# Altium footprint library Propia.PcbLib: 378 footprints (part 6 of 24)
Each footprint in its own frame and in the unit in brackets; x right, y up, seen from the top. Pads: shape width x height; smd on the part's side, far side on the other; paste and mask are expansions set on the pad; w line width, h text height; cw(c..) or ccw(c..) is an arc to the next point about the centre after c.
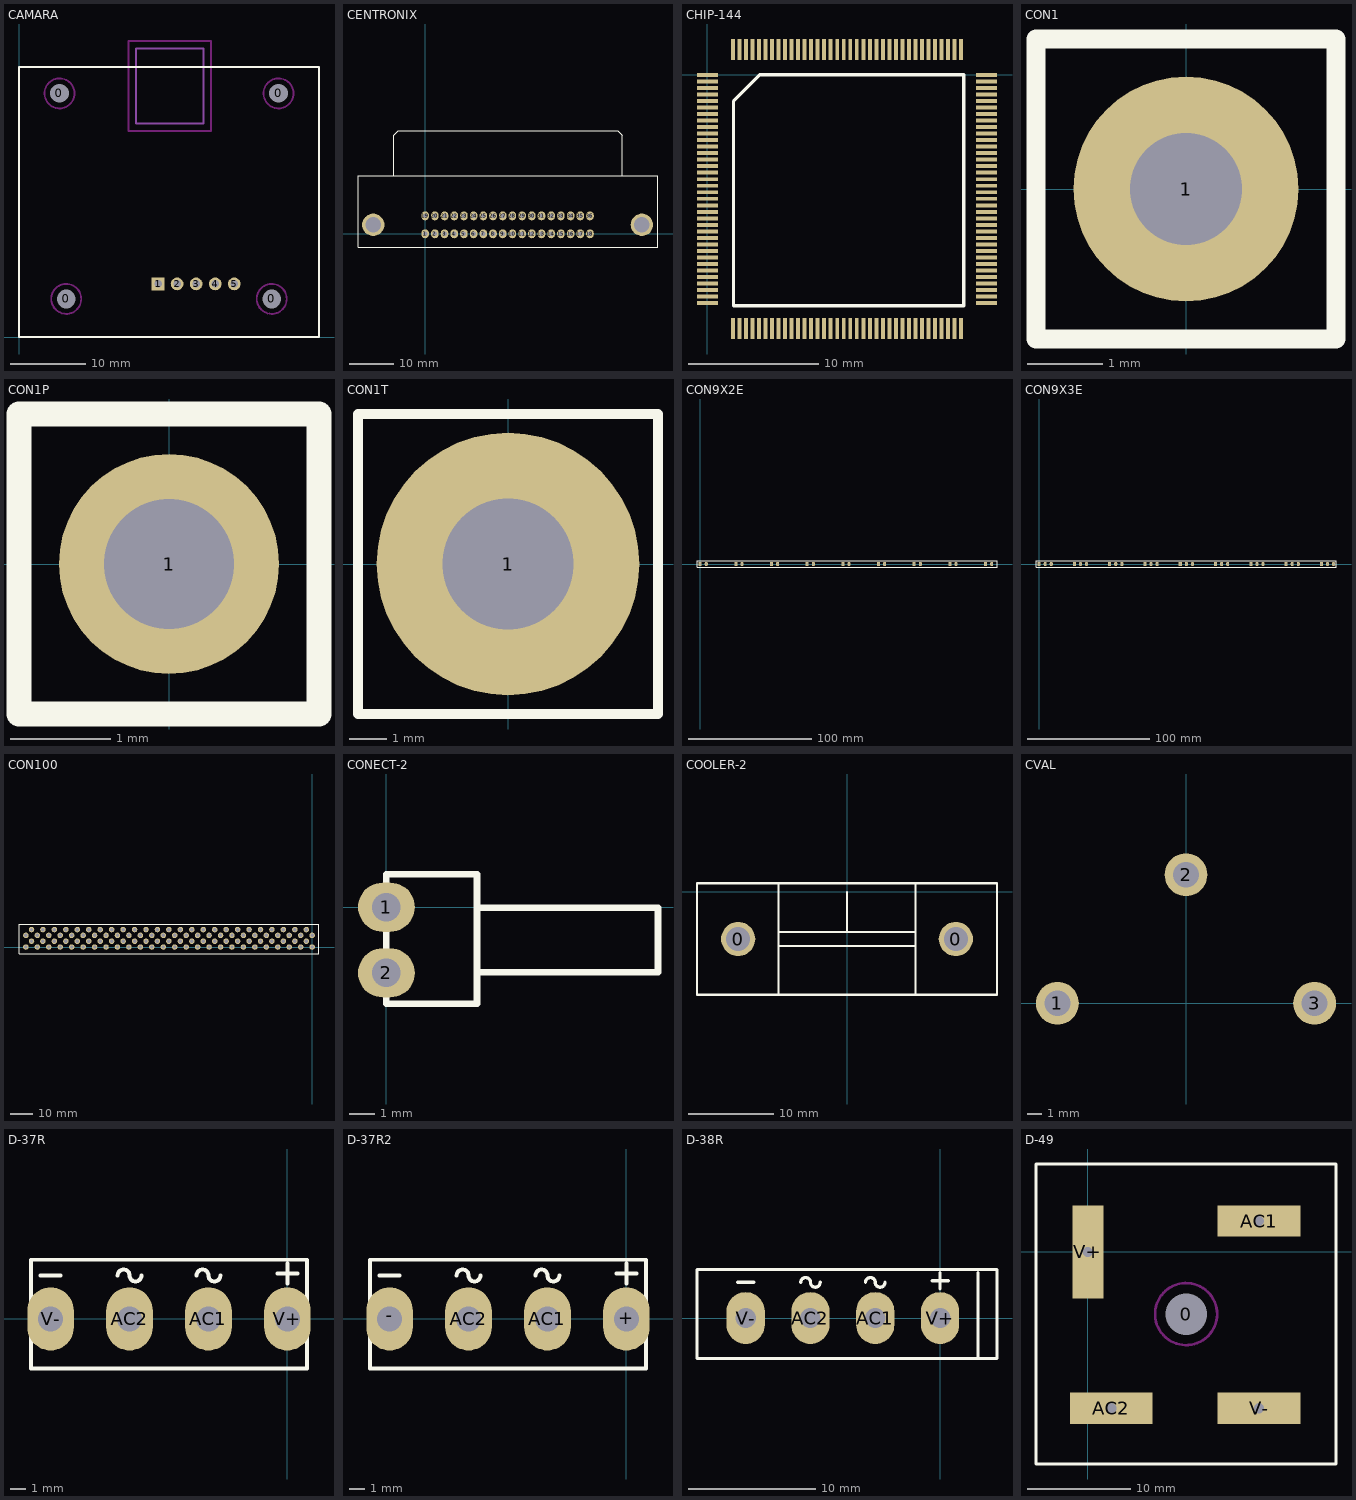
[diagram p5: the footprints below, top view; thin cyan lines are the x and y axes]

## CAMARA [mm]
pads (9):
  round 2 hole 2.5: 0(5.4,32.5) 0(6.3,5.1) 0(33.7,5.1) 0(34.6,32.5)
  rect 1.7x1.7 hole 1: 1(18.54,7.1)
  round 1.7 hole 1: 2(21.08,7.1) 3(23.62,7.1) 4(26.16,7.1) 5(28.7,7.1)
TopOverlay:
  lines w0.254: 0,0 40,0 40,36 0,36 0,0
KeepOutLayer:
  circle w0.254: c6.3,5.1 r2
  circle w0.254: c33.7,5.1 r2
  circle w0.254: c34.6,32.5 r2
  circle w0.254: c5.4,32.5 r2
  lines w0.254: 14.6,27.5 14.6,28.5 14.6,39.5 25.6,39.5 25.6,27.5 14.6,27.5
Mechanical1:
  lines w0.254: 15.6,28.5 24.6,28.5 24.6,38.5 15.6,38.5 15.6,28.5

## CENTRONIX [mm]
pads (38):
  oval 1.7x2 hole 1: 1(0,0) 2(2.165,0) 3(4.33,0) 4(6.495,0) 5(8.66,0) 6(10.825,0) 7(12.99,0) 8(15.155,0) 9(17.32,0) 10(19.485,0) 11(21.65,0) 12(23.815,0) 13(25.98,0) 14(28.145,0) 15(30.31,0) 16(32.475,0) 17(34.64,0) 18(36.805,0) 19(0,4) 20(2.165,4) 21(4.33,4) 22(6.495,4) 23(8.66,4) 24(10.825,4) 25(12.99,4) 26(15.155,4) 27(17.32,4) 28(19.485,4) 29(21.65,4) 30(23.815,4) 31(25.98,4) 32(28.145,4) 33(30.31,4) 34(32.475,4) 35(34.64,4) 36(36.805,4)
  round 5 hole 3.5: ""(-11.6,2) ""(48.4,2)
TopOverlay:
  lines w0.254: -7,13 -7,22 -6,23 43,23 44,22 44,13 ; -15,-3 52,-3 52,-2 52,13 -15,13 -15,-3

## CHIP-144 [mm]
pads (144):
  rect 1.6x0.3 smd: 1(0,0) 2(0,-0.5) 3(0,-1) 4(0,-1.5) 5(0,-2) 6(0,-2.5) 7(0,-3) 8(0,-3.5) 9(0,-4) 10(0,-4.5) 11(0,-5) 12(0,-5.5) 13(0,-6) 14(0,-6.5) 15(0,-7) 16(0,-7.5) 17(0,-8) 18(0,-8.5) 19(0,-9) 20(0,-9.5) 21(0,-10) 22(0,-10.5) 23(0,-11) 24(0,-11.5) 25(0,-12) 26(0,-12.5) 27(0,-13) 28(0,-13.5) 29(0,-14) 30(0,-14.5) 31(0,-15) 32(0,-15.5) 33(0,-16) 34(0,-16.5) 35(0,-17) 36(0,-17.5) 73(21.4,-17.5) 74(21.4,-17) 75(21.4,-16.5) 76(21.4,-16) 77(21.4,-15.5) 78(21.4,-15) 79(21.4,-14.5) 80(21.4,-14) 81(21.4,-13.5) 82(21.4,-13) 83(21.4,-12.5) 84(21.4,-12) 85(21.4,-11.5) 86(21.4,-11) 87(21.4,-10.5) 88(21.4,-10) 89(21.4,-9.5) 90(21.4,-9) 91(21.4,-8.5) 92(21.4,-8) 93(21.4,-7.5) 94(21.4,-7) 95(21.4,-6.5) 96(21.4,-6) 97(21.4,-5.5) 98(21.4,-5) 99(21.4,-4.5) 100(21.4,-4) 101(21.4,-3.5) 102(21.4,-3) 103(21.4,-2.5) 104(21.4,-2) 105(21.4,-1.5) 106(21.4,-1) 107(21.4,-0.5) 108(21.4,0)
  rect 0.3x1.6 smd: 37(1.95,-19.45) 38(2.45,-19.45) 39(2.95,-19.45) 40(3.45,-19.45) 41(3.95,-19.45) 42(4.45,-19.45) 43(4.95,-19.45) 44(5.45,-19.45) 45(5.95,-19.45) 46(6.45,-19.45) 47(6.95,-19.45) 48(7.45,-19.45) 49(7.95,-19.45) 50(8.45,-19.45) 51(8.95,-19.45) 52(9.45,-19.45) 53(9.95,-19.45) 54(10.45,-19.45) 55(10.95,-19.45) 56(11.45,-19.45) 57(11.95,-19.45) 58(12.45,-19.45) 59(12.95,-19.45) 60(13.45,-19.45) 61(13.95,-19.45) 62(14.45,-19.45) 63(14.95,-19.45) 64(15.45,-19.45) 65(15.95,-19.45) 66(16.45,-19.45) 67(16.95,-19.45) 68(17.45,-19.45) 69(17.95,-19.45) 70(18.45,-19.45) 71(18.95,-19.45) 72(19.45,-19.45) 109(19.45,1.95) 110(18.95,1.95) 111(18.45,1.95) 112(17.95,1.95) 113(17.45,1.95) 114(16.95,1.95) 115(16.45,1.95) 116(15.95,1.95) 117(15.45,1.95) 118(14.95,1.95) 119(14.45,1.95) 120(13.95,1.95) 121(13.45,1.95) 122(12.95,1.95) 123(12.45,1.95) 124(11.95,1.95) 125(11.45,1.95) 126(10.95,1.95) 127(10.45,1.95) 128(9.95,1.95) 129(9.45,1.95) 130(8.95,1.95) 131(8.45,1.95) 132(7.95,1.95) 133(7.45,1.95) 134(6.95,1.95) 135(6.45,1.95) 136(5.95,1.95) 137(5.45,1.95) 138(4.95,1.95) 139(4.45,1.95) 140(3.95,1.95) 141(3.45,1.95) 142(2.95,1.95) 143(2.45,1.95) 144(1.95,1.95)
TopOverlay:
  lines w0.254: 2,-17.7 19.65,-17.7 19.65,0 4,0 2,-2 2,-17.7

## CON1 [mm]
pads (1):
  round 3 hole 1.5: 1(0,0)
TopOverlay:
  lines w0.254: -2,-0.03 -2,2 2,2 2,-2 -2,-2 -2,0

## CON1P [mm]
pads (1):
  round 2.2 hole 1.3: 1(0,0)
TopOverlay:
  lines w0.254: -1.5,-1.5 -1.5,1.5 1.5,1.5 1.5,-1.5 0,-1.5 -1.5,-1.5

## CON1T [mm]
pads (1):
  round 7 hole 3.5: 1(0,0)
TopOverlay:
  lines w0.254: -4,-4 4,-4 4,4 -4,4 -4,-4

## CON9X2E [mm]
pads (18):
  rect 2.5x3.5 hole 1.2: 1(0,0) 3(29,0) 5(58,0) 7(87,0) 9(116,0) 11(145,0) 13(174,0) 15(203,0) 17(232,0)
  oval 2.5x3.5 hole 1.2: 2(5,0) 4(34,0) 6(63,0) 8(92,0) 10(121,0) 12(150,0) 14(179,0) 16(208,0) 18(237,0)
TopOverlay:
  lines w0.254: -2.54,-2.54 -2.54,-2.032 -2.54,2.54 241.3,2.54 241.3,-2.54 -2.54,-2.54

## CON9X3E [mm]
pads (27):
  rect 2.5x3.5 hole 1.2: 1(0,0) 4(29,0) 7(58,0) 10(87,0) 13(116,0) 16(145,0) 19(174,0) 22(203,0) 25(232,0)
  oval 2.5x3.5 hole 1.2: 2(5,0) 3(10,0) 5(34,0) 6(39,0) 8(63,0) 9(68,0) 11(92,0) 12(97,0) 14(121,0) 15(126,0) 17(150,0) 18(155,0) 20(179,0) 21(184,0) 23(208,0) 24(213,0) 26(237,0) 27(242,0)
TopOverlay:
  lines w0.254: -2.54,-2.54 -2.54,-2.032 -2.54,2.54 244,2.54 244,-2.54 -2.54,-2.54

## CON100 [mm]
pads (102):
  round 2.4 hole 1.5: 1(-2.54,2.54) 1(-2.54,7.62) 1(0,0) 1(0,5.08) 2(-7.54,2.54) 2(-7.54,7.62) 2(-5,0) 2(-5,5.08) 3(-12.54,2.54) 3(-12.54,7.62) 3(-10,0) 3(-10,5.08) 4(-17.54,2.54) 4(-17.54,7.62) 4(-15,0) 4(-15,5.08) 5(-22.54,2.54) 5(-22.54,7.62) 5(-20,0) 5(-20,5.08) 6(-27.54,2.54) 6(-27.54,7.62) 6(-25,0) 6(-25,5.08) 7(-32.54,2.54) 7(-32.54,7.62) 7(-30,0) 7(-30,5.08) 8(-37.54,2.54) 8(-37.54,7.62) 8(-35,0) 8(-35,5.08) 9(-42.54,2.54) 9(-42.54,7.62) 9(-40,0) 9(-40,5.08) 10(-47.54,2.54) 10(-47.54,7.62) 10(-45,0) 10(-45,5.08) 11(-52.54,2.54) 11(-52.54,7.62) 11(-50,0) 11(-50,5.08) 12(-57.54,2.54) 12(-57.54,7.62) 12(-55,0) 12(-55,5.08) 13(-62.54,2.54) 13(-62.54,7.62) 13(-60,0) 13(-60,5.08) 14(-67.54,2.54) 14(-67.54,7.62) 14(-65,0) 14(-65,5.08) 15(-72.54,2.54) 15(-72.54,7.62) 15(-70,0) 15(-70,5.08) 16(-77.54,2.54) 16(-77.54,7.62) 16(-75,0) 16(-75,5.08) 17(-82.54,2.54) 17(-82.54,7.62) 17(-80,0) 17(-80,5.08) 18(-87.54,2.54) 18(-87.54,7.62) 18(-85,0) 18(-85,5.08) 19(-92.54,2.54) 19(-92.54,7.62) 19(-90,0) 19(-90,5.08) 20(-97.54,2.54) 20(-97.54,7.62) 20(-95,0) 20(-95,5.08) 21(-102.54,2.54) 21(-102.54,7.62) 21(-100,0) 21(-100,5.08) 22(-107.54,2.54) 22(-107.54,7.62) 22(-105,0) 22(-105,5.08) 23(-112.54,2.54) 23(-112.54,7.62) 23(-110,0) 23(-110,5.08) 24(-117.54,2.54) 24(-117.54,7.62) 24(-115,0) 24(-115,5.08) 25(-122.54,2.54) 25(-122.54,7.62) 25(-120,0) 25(-120,5.08) 26(-125,0) 26(-125,5.08)
TopOverlay:
  lines w0.254: -128,-3 -128,10 3,10 3,-3 -128,-3

## CONECT-2 [mm]
pads (2):
  oval 2.2x1.9 hole 1.1: 1(0,0) 2(0,-2.54)
TopOverlay:
  lines w0.254: 3.5,-2.52 10.5,-2.52 10.5,-0.02 3.5,-0.02 ; 0,-3.73 3.5,-3.73 3.5,1.27 0,1.27 0,-3.73

## COOLER-2 [mm]
pads (2):
  round 4 hole 2.8: 0(-12.7,-5.49) 0(12.7,-5.49)
TopOverlay:
  lines w0.254: -8.01,-11.96 -8,-11.95 -8,-6.29 ; -8,-5 -8,0.95 -7.99,0.96 ; 0,-4.69 0,0 ; 7.98,0.99 8,0.97 8,-6.1 ; 8,-6.15 8,-11.95 8.03,-11.98 ; -8,-6.29 -8,-4.69 8,-4.69 8,-6.29 -8,-6.29 ; -17.5,-11.99 17.5,-11.99 17.5,1.01 -17.5,1.01 -17.5,-11.99

## CVAL [mm]
pads (3):
  round 3 hole 1.8: 1(-9,0) 2(0,9) 3(9,0)

## D-37R [mm]
pads (4):
  oval 3x4.064 hole 1.6: AC1(-5.08,0) AC2(-10.16,0) V+(0,0) V-(-15.24,0)
TopOverlay:
  lines w0.254: -15.875,2.794 -14.605,2.794 ; -10.922,2.794 cw(c-10.541,2.794) -10.16,2.794 ccw(c-9.779,2.794) -9.398,2.794 ; -5.842,2.794 cw(c-5.461,2.794) -5.08,2.794 ccw(c-4.699,2.794) -4.318,2.794 ; -0.635,2.921 0.635,2.921 ; 0,2.286 0,3.556 ; -16.51,-3.175 -16.51,3.81 1.27,3.81 1.27,-3.175 -16.51,-3.175

## D-37R2 [mm]
pads (4):
  oval 3x4.064 hole 1.6: +(0,0) -(-15.24,0) AC1(-5.08,0) AC2(-10.16,0)
TopOverlay:
  lines w0.254: -15.875,2.794 -14.605,2.794 ; -10.922,2.794 cw(c-10.541,2.794) -10.16,2.794 ccw(c-9.779,2.794) -9.398,2.794 ; -5.842,2.794 cw(c-5.461,2.794) -5.08,2.794 ccw(c-4.699,2.794) -4.318,2.794 ; -0.635,2.921 0.635,2.921 ; 0,2.286 0,3.556 ; -16.51,-3.175 -16.51,3.81 1.27,3.81 1.27,-3.175 -16.51,-3.175

## D-38R [mm]
pads (4):
  oval 3x4.064 hole 1.6: AC1(-5.08,0) AC2(-10.16,0) V+(0,0) V-(-15.24,0)
TopOverlay:
  lines w0.254: -15.875,2.794 -14.605,2.794 ; -10.922,2.794 cw(c-10.541,2.794) -10.16,2.794 ccw(c-9.779,2.794) -9.398,2.794 ; -5.842,2.794 cw(c-5.461,2.794) -5.08,2.794 ccw(c-4.699,2.794) -4.318,2.794 ; -0.635,2.921 0.635,2.921 ; 0,2.286 0,3.556 ; 2.98,-3.18 2.98,3.57 ; -19.05,-3.175 -19.05,3.81 4.46,3.81 4.46,-3.175 -19.05,-3.175

## D-49 [mm]
pads (5):
  round 3.5 hole 4: 0(9.497,-6.007)
  rect 8x3 hole 1: AC1(16.55,2.99) AC2(2.27,-15.11) V-(16.55,-15.11)
  rect 3x9 hole 1: V+(0,0)
TopOverlay:
  lines w0.254: 23.99,-20.5 23.99,8.5 -5.01,8.5 -5.01,-20.5 23.99,-20.5 ; 23.99,-20.5 23.99,-20.5
KeepOutLayer:
  circle w0.254: c9.497,-6.007 r3
Mechanical1:
  lines w0.3: -0.63,-15.11 5.17,-15.11 ; 0,-2.9 0,2.9 ; 13.65,-15.11 19.45,-15.11 ; 13.65,2.99 19.45,2.99